# Altium schematic symbol library Battery.SchLib: 1 symbol
Pins are listed as number, name and electrical type; pins without a type are passive.

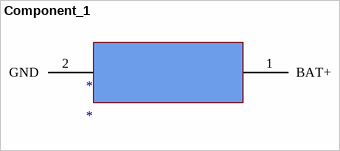
[diagram p0: symbol Component_1]

## Component_1
designator *
Chemistry: Li-ion; Voltage: 3.0-4.2V; Cells: 1S
footprint BATTERY_2PIN (Footprint not found)
pins: 1 BAT+ (power), 2 GND (power)